# Altium integrated library ACS37630LOLTR-004B5.IntLib: 1 symbol
Pins are listed as number, name and electrical type; pins without a type are passive.

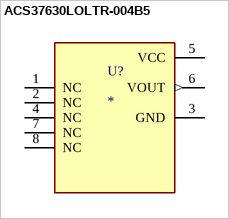
[diagram p0: symbol ACS37630LOLTR-004B5]

## ACS37630LOLTR-004B5
designator U?
Linear Vertical Hall-Effect Sensor IC for U-Core Current Sensing; MF: Allegro MicroSystems LLC; MP: ACS37630LOLTR-004B5; SnapEDA_Link: https://www.snapeda.com/parts/ACS37630LOLTR-004B5/Allegro+MicroSystems+LLC/view-part/?ref=snap; Package: None; Value: *; Check_prices: https://www.snapeda.com/parts/ACS37630LOLTR-004B5/Allegro+MicroSystems+LLC/view-part/?ref=eda
footprint SOIC127P600X175-8N
pins: 1 NC, 2 NC, 3 GND (power), 4 NC, 5 VCC (power), 6 VOUT (out), 7 NC, 8 NC